# Altium footprint library RBM_ALTIUM_PCB_LIBRARY.PcbLib: 107 footprints (part 6 of 7)
Each footprint in its own frame and in the unit in brackets; x right, y up, seen from the top. Pads: shape width x height; smd on the part's side, far side on the other; paste and mask are expansions set on the pad; w line width, h text height; cw(c..) or ccw(c..) is an arc to the next point about the centre after c.
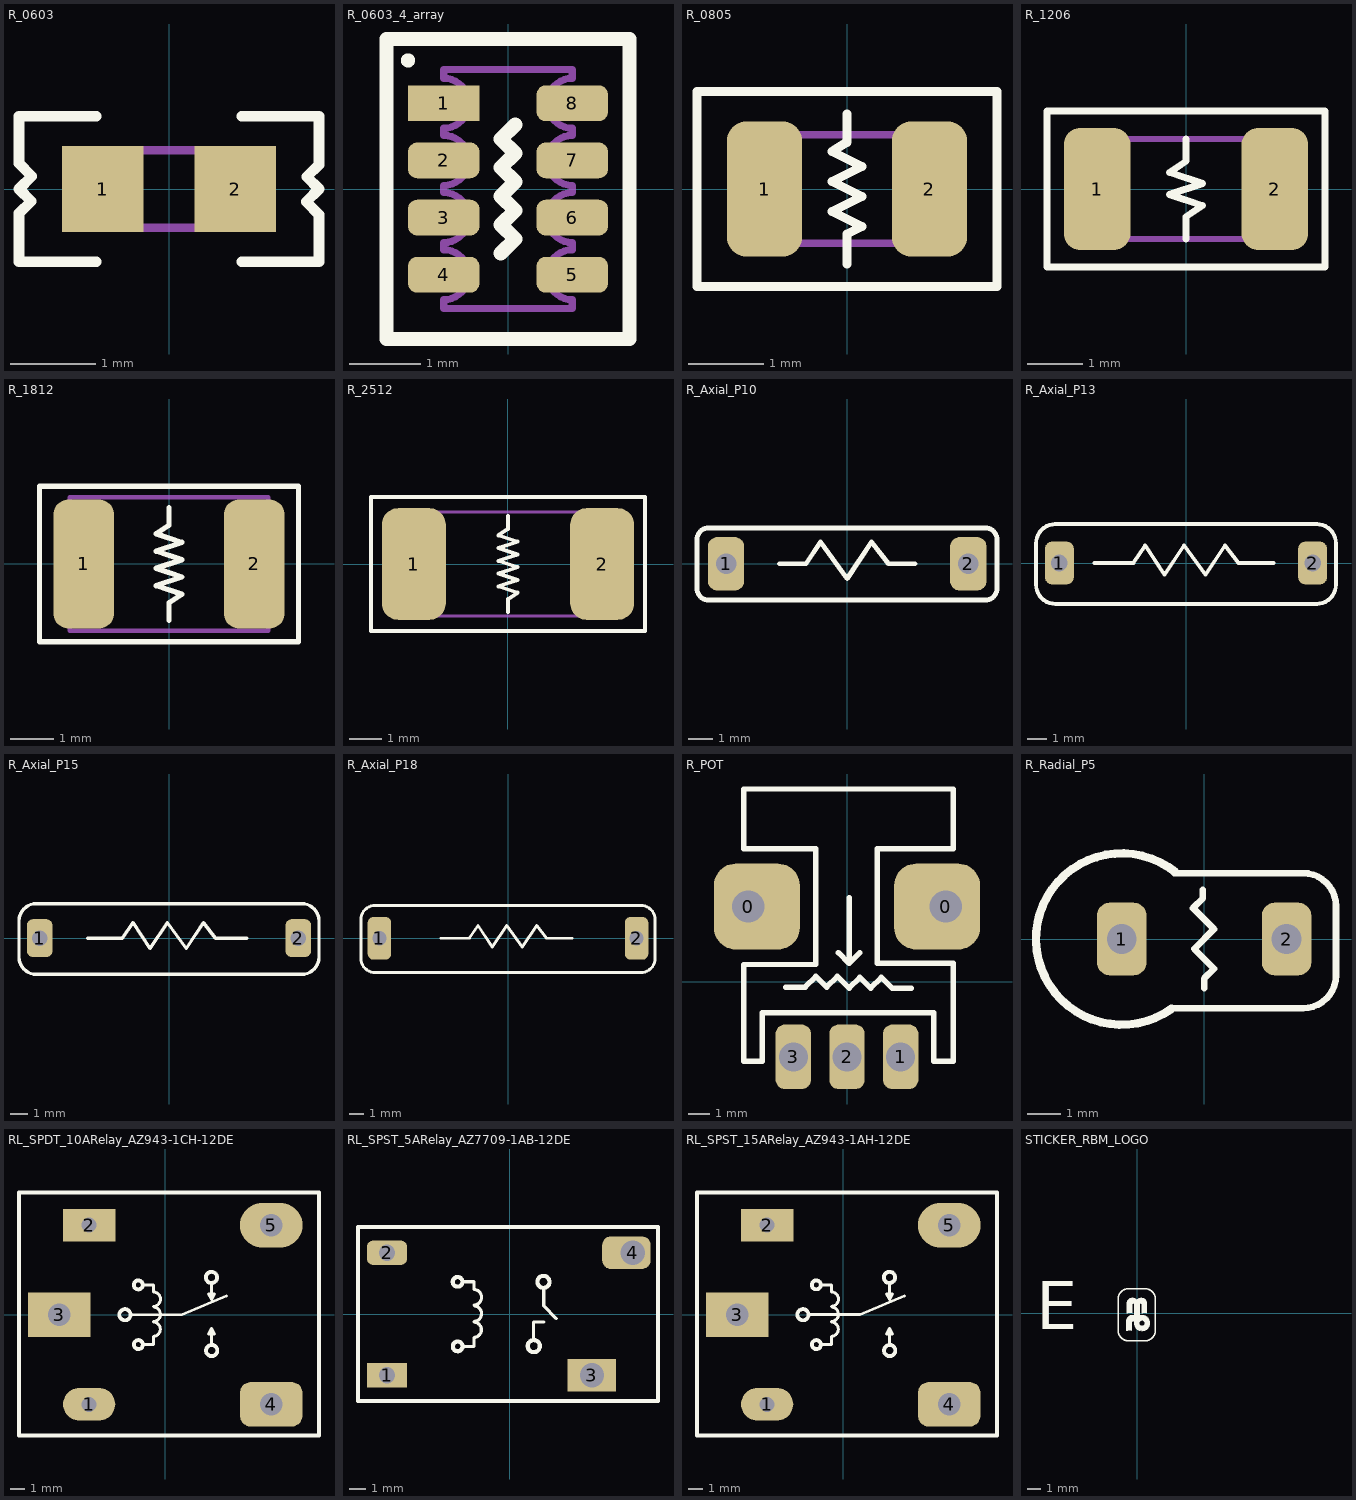
[diagram p5: the footprints below, top view; thin cyan lines are the x and y axes]

## R_0603 [mm] "RK73G1JTTD1000F; 0603 Chip Resistor - Surface Mount RoHS"
height 0.55
pads (2):
  rect 0.95x1 smd: 1(-0.775,0) 2(0.775,0)
Top Overlay:
  lines w0.125: -1.75,-0.85 -1.75,-0.286 ; -1.75,-0.283 -1.609,-0.141 -1.75,0 -1.6,0.15 -1.75,0.3 -1.75,0.85 -0.85,0.85 ; -1.746,-0.85 -0.85,-0.85 ; 0.85,-0.85 1.75,-0.85 1.75,-0.3 1.6,-0.15 1.75,0 1.609,0.141 1.75,0.283 ; 0.85,0.85 1.746,0.85 ; 1.75,0.286 1.75,0.85
Assembly Top:
  lines w0.1: -0.9,-0.45 -0.9,0.45 0.9,0.45 0.9,-0.45 -0.9,-0.45
3D body "R_0603.step": height 0.55, standoff 0, extent -0.9,-0.45 0.9,0.45

## R_0603_4_array [mm] "Chip Array, Concave, 8-Leads, Pitch 0.80mm,  Body 3.20x1.60mm,  IPC Medium Density"
height 0.7
pads (8):
  rect 1x0.5 smd: 1(-0.9,1.2)
  rrect50% 1x0.5 smd: 2(-0.9,0.4) 3(-0.9,-0.4) 4(-0.9,-1.2) 5(0.9,-1.2) 6(0.9,-0.4) 7(0.9,0.4) 8(0.9,1.2)
Top Overlay:
  circle w0.1: c-1.4,1.8 r0.05
  lines w0.2: -0.1,-0.9 0.1,-0.7 -0.1,-0.5 0.1,-0.3 -0.1,-0.1 0.1,0.1 -0.1,0.3 0.1,0.5 -0.1,0.7 0.1,0.9 ; -1.7,-2.1 1.7,-2.1 1.7,2.1 -1.7,2.1 -1.7,-2.1
Mechanical 13:
  lines w0.1: -0.9,-1.675 0.9,-1.675 0.9,-1.55 cw(c0.9,-1.2) 0.9,-0.85 0.9,-0.75 cw(c0.9,-0.4) 0.9,-0.05 0.9,0.05 cw(c0.9,0.4) 0.9,0.75 0.9,0.85 cw(c0.9,1.2) 0.9,1.55 0.9,1.675 -0.9,1.675 -0.9,1.55 cw(c-0.9,1.2) -0.9,0.85 -0.9,0.75 cw(c-0.9,0.4) -0.9,0.05 -0.9,-0.05 cw(c-0.9,-0.4) -0.9,-0.75 -0.9,-0.85 cw(c-0.9,-1.2) -0.9,-1.55 -0.9,-1.675
3D body "R_0603_4_array.step": height 0.7, standoff 0, extent -0.95,-1.675 0.95,1.675

## R_0805 [mm]
height 0.65
pads (2):
  rrect50% 1x1.8 smd: 1(-1.1,0) 2(1.1,0)
Top Overlay:
  lines w0.125: 0,-1 0,-0.6 0.2,-0.5 -0.2,-0.3 0.2,-0.1 -0.2,0.1 0.2,0.3 -0.2,0.5 0,0.625 0,1 ; -2,-1.3 -2,1.3 2,1.3 2,-1.3 -2,-1.3
Mechanical 13:
  lines w0.1: -1.1,-0.725 1.1,-0.725 1.1,0.725 -1.1,0.725 -1.1,-0.725
3D body "R_0805.step": height 0.65, standoff 0, extent -1.1,-0.725 1.1,0.725

## R_1206 [mm]
height 0.65
pads (2):
  rrect50% 1.2x2.2 smd: 1(-1.6,0) 2(1.6,0)
Top Overlay:
  lines w0.125: 0,-0.9 0,-0.5 0.3,-0.3 -0.3,-0.1 0.3,0.1 -0.3,0.3 0,0.5 0,0.9 ; -2.5,-1.4 2.5,-1.4 2.5,1.4 -2.5,1.4 -2.5,-1.4
Mechanical 13:
  lines w0.1: -1.65,-0.9 -1.65,0.9 1.65,0.9 1.65,-0.9 -1.65,-0.9
3D body "R_1206.step": height 0.65, standoff 0, extent -1.65,-0.9 1.65,0.9

## R_1812 [mm] "Chip Resistor, 2-Leads, Body 4.50x3.00mm, IPC Medium Density"
height 0.6
pads (2):
  rrect50% 1.4x3 smd: 1(-1.975,0) 2(1.975,0)
Top Overlay:
  lines w0.125: 0,-1.3 0,-0.9 0.3,-0.7 -0.3,-0.5 0.3,-0.3 -0.3,-0.1 0.3,0.1 -0.3,0.3 0.3,0.5 -0.3,0.7 0,0.9 0,1.3 ; -3,-1.8 -3,1.8 3,1.8 3,-1.8 -3,-1.8
Assembly Top:
  lines w0.1: -2.3,-1.55 2.3,-1.55 2.3,1.55 -2.3,1.55 -2.3,-1.55
3D body "RESC4530X06N.step": height 0.6, standoff 0, extent -2.3,-1.55 2.3,1.55

## R_2512 [mm] "Chip Resistor, 2-Leads, Body 6.35x3.10mm, IPC Medium Density"
height 0.65
pads (2):
  rrect50% 2x3.5 smd: 1(-2.95,0) 2(2.95,0)
Top Overlay:
  lines w0.125: 0,-1.5 0,-1.1 0.3,-0.9 -0.3,-0.7 0.3,-0.5 -0.3,-0.3 0.3,-0.1 -0.3,0.1 0.3,0.3 -0.3,0.5 0.3,0.7 -0.3,0.9 0,1.1 0,1.5 ; -4.3,-2.1 -4.3,2.1 4.3,2.1 4.3,-2.1 -4.3,-2.1
Mechanical 13:
  lines w0.1: -3.275,-1.625 -3.275,1.625 3.275,1.625 3.275,-1.625 -3.275,-1.625
3D body "R_2512.step": height 0.65, standoff 0, extent -3.275,-1.625 3.275,1.625

## R_Axial_P10 [mm] "Resistors 7mm Length"
pads (2):
  rrect50% 1.5x2.2 hole 0.85: 1(-5,0) 2(5,0)
Top Overlay:
  lines w0.2: -2.8,0 -1.7,0 -1.1,0.9 0,-0.6 1,0.9 1.7,0 2.8,0 ; -6.2,-1.017 ccw(c-5.717,-1.017) -5.717,-1.5 5.7,-1.5 ccw(c5.7,-1.017) 6.183,-1.017 6.183,1 ccw(c5.7,1) 5.7,1.483 -5.717,1.483 ccw(c-5.717,1) -6.2,1 -6.2,-1.017
3D body "User Library-Res40-Axial 0_25W-2_2R.step": height 2.41, standoff -2, extent -5.38,-1.2 5.38,1.2

## R_Axial_P13 [mm] "Resistors 10.5mm Length"
pads (2):
  rrect50% 1.5x2.2 hole 0.85: 1(-6.5,0) 2(6.5,0)
Top Overlay:
  lines w0.2: -6.725,2 6.725,2 ; -6.7,2 ccw(c-6.7,1) -7.7,1 -7.7,-1.1 ccw(c-6.7,-1.1) -6.7,-2.1 6.725,-2.1 ; -4.7,0 -2.7,0 -2.1,0.9 -1.1,-0.6 -0.1,0.9 1,-0.6 2,0.9 2.7,0 4.5,0 ; 6.7,-2.1 ccw(c6.7,-1.1) 7.7,-1.1 7.7,1 ccw(c6.7,1) 6.7,2
3D body "User Library-Res50-Axial 0_5W-2_2K.step": height 5.87, standoff -3.5, extent -6.725,-1.875 6.725,1.875

## R_Axial_P15 [mm] "Resistors 12mm Length"
pads (2):
  rrect50% 1.5x2.2 hole 0.9: 1(-7.5,0) 2(7.5,0)
Top Overlay:
  lines w0.2: -4.7,0 -2.7,0 -2.1,0.9 -1.1,-0.6 -0.1,0.9 1,-0.6 2,0.9 2.7,0 4.5,0 ; -8.7,-1.1 ccw(c-7.7,-1.1) -7.7,-2.1 7.7,-2.1 ccw(c7.7,-1.1) 8.7,-1.1 8.7,1 ccw(c7.7,1) 7.7,2 -7.7,2 ccw(c-7.7,1) -8.7,1 -8.7,-1.1
3D body "User Library-Res50-Axial 0_5W-2_2K.step": height 5.87, standoff -3.5, extent -6.725,-1.875 6.725,1.875

## R_Axial_P18 [mm] "220 ohm 2W 5%"
pads (2):
  rrect50% 1.65x3 hole 1: 1(-9,0) 2(9,0)
Top Overlay:
  lines w0.2: -4.7,0 -2.7,0 -2.1,0.9 -1.1,-0.6 -0.1,0.9 1,-0.6 2,0.9 2.7,0 4.5,0 ; -10.3,-1.4 ccw(c-9.3,-1.4) -9.3,-2.4 9.3,-2.4 ccw(c9.3,-1.4) 10.3,-1.4 10.3,1.3 ccw(c9.3,1.3) 9.3,2.3 -9.3,2.3 ccw(c-9.3,1.3) -10.3,1.3 -10.3,-1.4

## R_POT [mm]
pads (5):
  rrect50% 4x4 hole 1.5 square copper offset 0.4,0: 0(-4.6,3.5)
  rrect50% 4x4 hole 1.5 square copper offset -0.4,0: 0(4.6,3.5)
  rrect50% 1.65x3 hole 1.35: 1(2.5,-3.5) 2(0,-3.5) 3(-2.5,-3.5)
Top Overlay:
  lines w0.254: -2.85,-0.25 -1.95,-0.25 -1.45,0.25 ; -0.4,1.35 0.1,0.85 ; 0.05,-0.25 -0.45,0.25 ; 0.1,3.9 0.1,0.85 ; 0.6,1.35 0.1,0.85 ; 3,-0.3 2.1,-0.3 1.6,0.2 1.1,-0.3 ; -1.45,0.25 -0.95,-0.25 -0.45,0.25 ; -1.45,0.25 -1.45,0.25 ; -0.45,0.25 -0.45,0.25 ; 0.1,-0.3 0.6,0.2 1.1,-0.3 ; 0.1,-0.3 0.1,-0.3 ; 1.1,-0.3 1.1,-0.3 ; -4.8,-3.7 -3.95,-3.7 -3.95,-1.45 4.05,-1.45 4.05,-3.7 4.952,-3.7 4.952,0.85 1.4,0.85 1.4,6.2 4.952,6.2 4.952,8.975 -4.8,8.975 -4.8,6.2 -1.45,6.2 -1.45,0.8 -4.8,0.8 -4.8,-3.7
3D body "SW3dPS-Potentiometer 250U.STEP": height 15.26, standoff -3.8, extent -4.876,-3.8 4.876,8.75

## R_Radial_P5 [mm] "All Through Hole Resistors"
pads (2):
  rrect50% 1.5x2.2 hole 0.9: 1(-2.5,0) 2(2.5,0)
Top Overlay:
  lines w0.2: -1,-2.1 3,-2.1 ccw(c3,-1.1) 4,-1.1 4,1 ccw(c3,1) 3,2 -0.9,2 ; -0.038,1.5 -0.038,1.238 -0.337,0.938 0.3,0.3 ; 0,-1.5 0,-1.2 0.3,-0.9 -0.3,-0.3 ; -0.3,-0.3 -0.3,-0.3 ; -0.3,-0.3 0.3,0.3 ; 0.3,0.3 0.3,0.3
  lines w0.254: -0.989,-2.116 cw(c-2.5,0) -0.876,2.03
3D body "Res_Radial_5mmP.STEP": height 15.25, standoff -3, extent -5,-2.5 2.75,2.5

## RL_SPDT_10ARelay_AZ943-1CH-12DE [mm]
pads (5):
  oval 3.5x2.2 hole 1: 1(-5.1,-6)
  rect 3.5x2.2 hole 1: 2(-5.1,6)
  rect 4.2x3 hole 1.5: 3(-7.1,0)
  rrect50% 4.2x3 hole 1.5: 4(7.1,-6)
  oval 4.2x3 hole 1.5: 5(7.1,6)
Top Overlay:
  circle w0.254: c-1.8,-2.001 r0.3
  circle w0.254: c-1.804,2 r0.3
  circle w0.254: c3.111,-2.4 r0.376
  circle w0.254: c3.096,2.5 r0.376
  circle w0.254: c-2.704,0 r0.376
  lines w0.2: -2.329,0 1.096,0 4.109,1.268 ; -1.429,2 -0.789,2 -0.789,1.534 ; -1.424,-2.001 -0.784,-2.001 ; -0.791,-1.444 ccw(c-0.81,-0.968) -0.789,-0.492 ; -0.79,-0.458 ccw(c-0.81,0.028) -0.747,0.511 ; -0.79,0.559 ccw(c-0.81,1.046) -0.789,1.533 ; -0.789,-1.986 -0.789,-1.477 ; 3.096,-2.039 3.096,-0.906 ; 3.111,2.139 3.111,1.006 ; 2.896,1.4 3.111,1.006 ; 2.896,1.4 3.111,1.006 ; 2.896,1.4 3.111,1.4 ; 3.096,-1.3 3.311,-1.3 ; 3.096,-1.3 3.096,-0.906 ; 3.096,-1.3 2.896,-1.3 3.096,-0.906 ; 3.096,-0.906 3.311,-1.3 ; 3.096,-0.906 3.311,-1.3 ; 3.111,1.006 3.111,1.4 ; 3.111,1.006 3.311,1.4 3.111,1.4
  lines w0.254: -9.8,8.2 -9.8,-8.1 10.3,-8.1 10.3,8.2 -9.7,8.2
3D body: height 3, standoff -4, extent -5.348,-6.249 -4.85,-5.75
3D body: height 3, standoff -4, extent -7.695,-0.599 -6.5,0.599
3D body: height 3, standoff -4, extent -5.348,5.751 -4.85,6.25
3D body: height 3, standoff -4, extent 6.505,5.401 7.7,6.599
3D body: height 3, standoff -4, extent 6.505,-6.599 7.7,-5.401
3D body: height 15, standoff 0.56, extent -9.8,-8.1 10.3,8.2

## RL_SPST_5ARelay_AZ7709-1AB-12DE [mm]
pads (4):
  rect 2.5x1.5 hole 1: 1(-7.62,-3.8)
  rrect50% 2.5x1.5 hole 1: 2(-7.62,3.8)
  rect 3x2 hole 1.5: 3(5.08,-3.8)
  rrect50% 3x2 hole 1.5 copper offset -0.4,0: 4(7.62,3.8)
Top Overlay:
  circle w0.254: c-3.244,1.993 r0.3
  circle w0.254: c-3.24,-2.008 r0.3
  circle w0.254: c1.48,-1.993 r0.376
  circle w0.254: c2.08,1.993 r0.376
  lines w0.2: -2.869,1.993 -2.229,1.993 -2.229,1.526 ; -2.865,-2.008 -2.225,-2.008 ; -2.231,-1.451 ccw(c-2.25,-0.975) -2.229,-0.499 ; -2.231,-0.466 ccw(c-2.25,0.021) -2.187,0.504 ; -2.231,0.552 ccw(c-2.25,1.039) -2.229,1.525 ; -2.229,-1.993 -2.229,-1.484 ; 1.465,-1.632 1.465,-0.499 2.095,-0.499 ; 2.095,1.631 2.095,0.499 2.88,-0.286
  lines w0.254: -9.42,-5.4 9.18,-5.4 9.18,5.4 -9.42,5.4 -9.42,-5.4
3D body: height 15.5, standoff 0.56, extent -9.42,-5.4 9.18,5.4
3D body: height 3, standoff -4, extent 7.025,3.201 8.22,4.399
3D body: height 3, standoff -4, extent -7.868,3.551 -7.37,4.05
3D body: height 3, standoff -4, extent 4.485,-4.399 5.68,-3.201
3D body: height 3, standoff -4, extent -7.868,-4.049 -7.37,-3.55

## RL_SPST_15ARelay_AZ943-1AH-12DE [mm]
pads (5):
  oval 3.5x2.2 hole 1: 1(-5.1,-6)
  rect 3.5x2.2 hole 1: 2(-5.1,6)
  rect 4.2x3 hole 1.5: 3(-7.1,0)
  rrect50% 4.2x3 hole 1.5: 4(7.1,-6)
  oval 4.2x3 hole 1.5: 5(7.1,6)
Top Overlay:
  circle w0.254: c-2.704,0.001 r0.376
  circle w0.254: c3.096,2.501 r0.376
  circle w0.254: c3.111,-2.399 r0.376
  circle w0.254: c-1.804,2.001 r0.3
  circle w0.254: c-1.8,-2 r0.3
  lines w0.2: -2.329,0.001 1.096,0.001 4.109,1.269 ; -1.429,2.001 -0.789,2.001 -0.789,1.535 cw(c-0.81,1.047) -0.79,0.56 ; -1.424,-2 -0.784,-2 ; -0.791,-1.443 ccw(c-0.81,-0.967) -0.789,-0.491 ; -0.79,-0.457 ccw(c-0.81,0.029) -0.747,0.512 ; -0.789,-1.985 -0.789,-1.476 ; 3.096,-2.038 3.096,-0.905 ; 3.111,2.14 3.111,1.007 ; 2.896,1.401 3.111,1.401 ; 2.896,1.401 3.111,1.007 ; 2.896,1.401 3.111,1.007 ; 3.096,-1.299 2.896,-1.299 3.096,-0.905 ; 3.096,-1.299 3.096,-0.905 ; 3.096,-1.299 3.311,-1.299 ; 3.096,-0.905 3.311,-1.299 ; 3.096,-0.905 3.311,-1.299 ; 3.111,1.007 3.311,1.401 3.111,1.401 ; 3.111,1.007 3.111,1.401
  lines w0.254: -9.8,8.2 -9.8,-8.1 10.3,-8.1 10.3,8.2 -9.7,8.2
3D body: height 15, standoff 0.56, extent -9.8,-8.1 10.3,8.2
3D body: height 3, standoff -4, extent 6.505,-6.599 7.7,-5.401
3D body: height 3, standoff -4, extent 6.505,5.401 7.7,6.599
3D body: height 3, standoff -4, extent -5.348,5.751 -4.85,6.25
3D body: height 3, standoff -4, extent -7.695,-0.599 -6.5,0.599
3D body: height 3, standoff -4, extent -5.348,-6.249 -4.85,-5.75

## STICKER_RBM_LOGO [mm]
Top Layer:
  region: 10,1.7
  region: 10,1.7
  region: 10,1.7
  region: 10,1.7
  region: -3.6,-0.95
  region: -3.6,-0.95
  region: -3.6,-0.95
  region: -3.6,-0.95
Top Overlay:
  drawing of 2 lines, arcs and shapes, not listed
  text "E" at -7.396,-2.341 h6
Bottom Overlay:
  drawing of 26 lines, arcs and shapes, not listed